# Altium footprint library Footprint_Vlad.PcbLib: 392 footprints (part 8 of 25)
Each footprint in its own frame and in the unit in brackets; x right, y up, seen from the top. Pads: shape width x height; smd on the part's side, far side on the other; paste and mask are expansions set on the pad; w line width, h text height; cw(c..) or ccw(c..) is an arc to the next point about the centre after c.
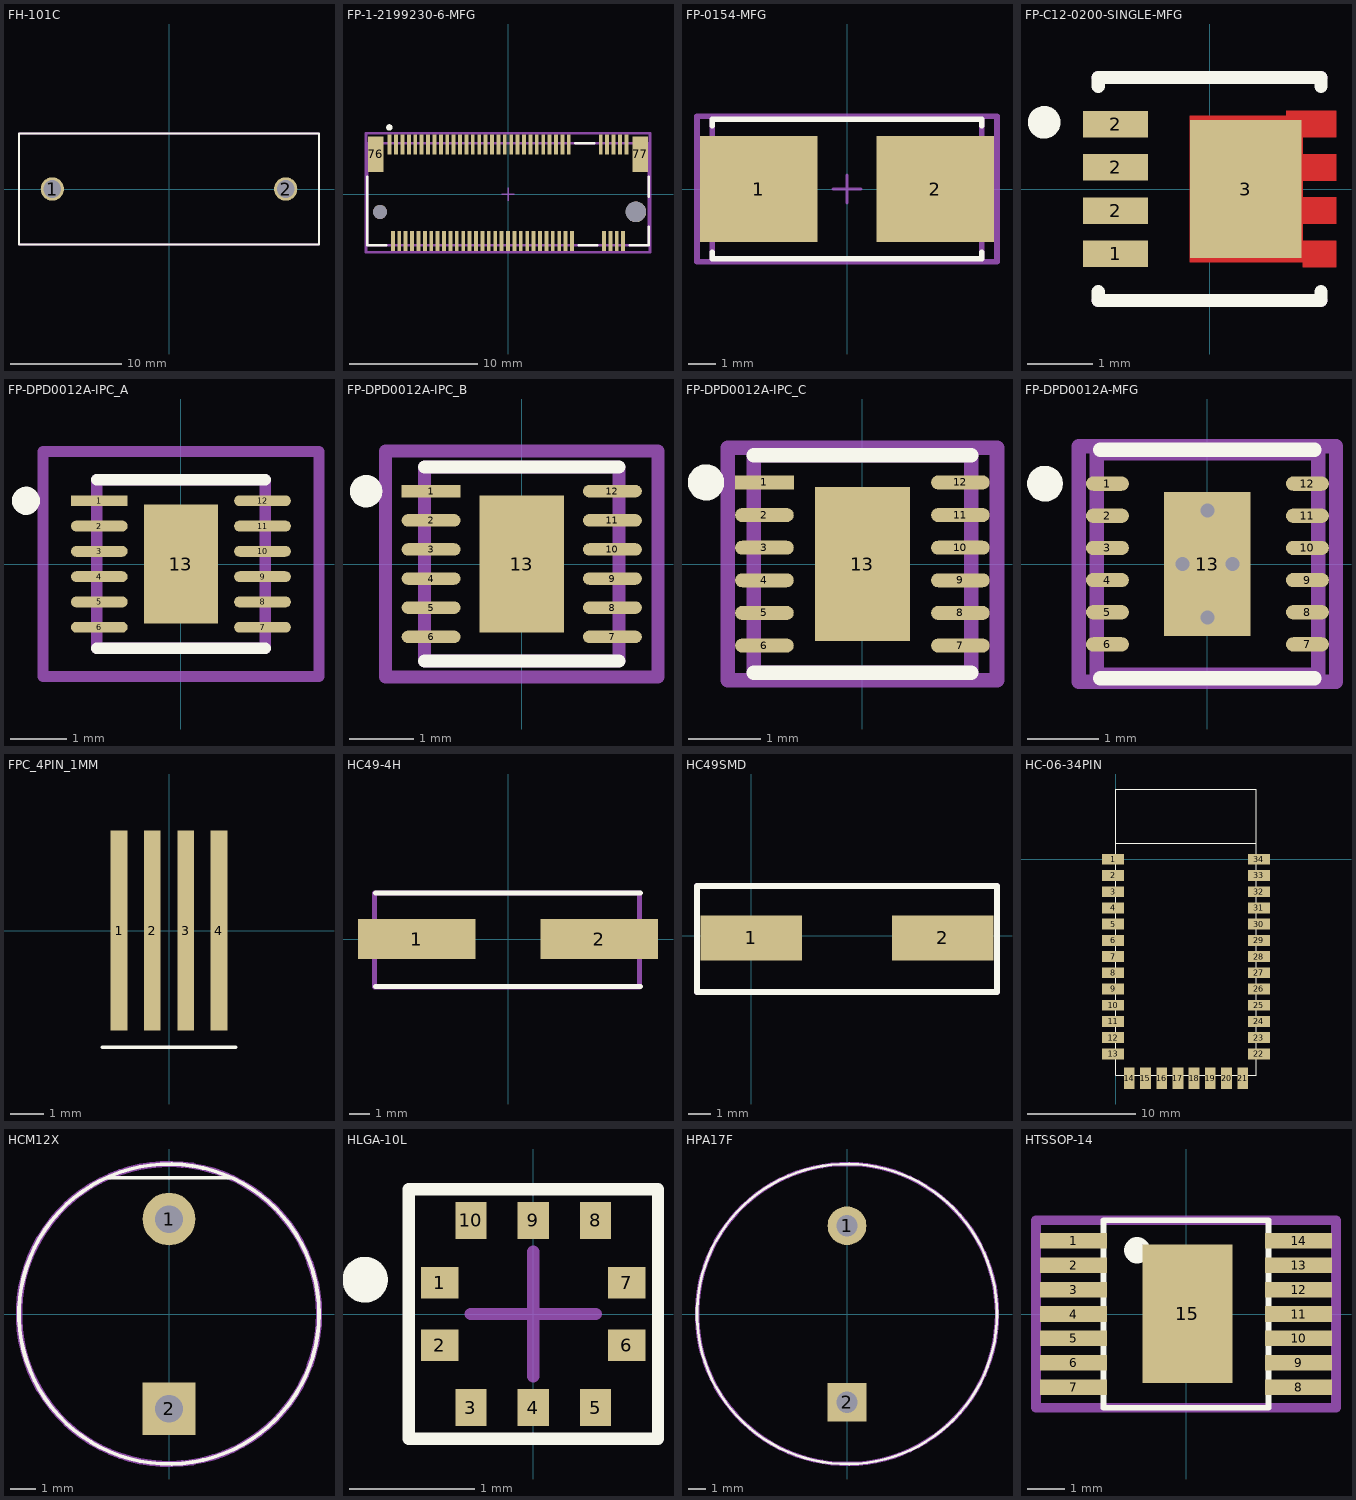
[diagram p7: the footprints below, top view; thin cyan lines are the x and y axes]

## FH-101C [mm]
pads (2):
  round 2.1 hole 1.6 unplated: 1(-10.5,0) 2(10.5,0)
Top Overlay:
  lines w0.2: -13.5,-5 13.5,-5 13.5,5 -13.5,5 -13.5,-5
Mechanical 13:
  lines w0.2: -13.5,-5 -13.5,5 13.5,5 13.5,-5 -13.5,-5
3D body: height 13.4, standoff 0, extent -13.6,-5.1 13.6,5.1

## FP-1-2199230-6-MFG [mm]
pads (71):
  rect 0.3x1.55 smd paste+0 mask+0: 1(-9.25,3.9) 2(-9,-3.65) 3(-8.75,3.9) 4(-8.5,-3.65) 5(-8.25,3.9) 6(-8,-3.65) 7(-7.75,3.9) 8(-7.5,-3.65) 9(-7.25,3.9) 10(-7,-3.65) 11(-6.75,3.9) 12(-6.5,-3.65) 13(-6.25,3.9) 14(-6,-3.65) 15(-5.75,3.9) 16(-5.5,-3.65) 17(-5.25,3.9) 18(-5,-3.65) 19(-4.75,3.9) 20(-4.5,-3.65) 21(-4.25,3.9) 22(-4,-3.65) 23(-3.75,3.9) 24(-3.5,-3.65) 25(-3.25,3.9) 26(-3,-3.65) 27(-2.75,3.9) 28(-2.5,-3.65) 29(-2.25,3.9) 30(-2,-3.65) 31(-1.75,3.9) 32(-1.5,-3.65) 33(-1.25,3.9) 34(-1,-3.65) 35(-0.75,3.9) 36(-0.5,-3.65) 37(-0.25,3.9) 38(0,-3.65) 39(0.25,3.9) 40(0.5,-3.65) 41(0.75,3.9) 42(1,-3.65) 43(1.25,3.9) 44(1.5,-3.65) 45(1.75,3.9) 46(2,-3.65) 47(2.25,3.9) 48(2.5,-3.65) 49(2.75,3.9) 50(3,-3.65) 51(3.25,3.9) 52(3.5,-3.65) 53(3.75,3.9) 54(4,-3.65) 55(4.25,3.9) 56(4.5,-3.65) 57(4.75,3.9) 58(5,-3.65) 67(7.25,3.9) 68(7.5,-3.65) 69(7.75,3.9) 70(8,-3.65) 71(8.25,3.9) 72(8.5,-3.65) 73(8.75,3.9) 74(9,-3.65) 75(9.25,3.9)
  rect 1.2x2.75 smd paste+0 mask+0: 76(-10.35,3.125) 77(10.35,3.125)
  round 1.1 hole 1.1 unplated paste-1000 mask+0: ""(-10,-1.375)
  round 1.6 hole 1.6 unplated paste-1000 mask+0: ""(10,-1.375)
Top Overlay:
  circle w0.25: c-9.275,5.225 r0.125
  lines w0.2: -11,1.375 -11,-3.975 -9.525,-3.975 ; 5.275,3.975 6.725,3.975 ; 5.525,-3.975 6.975,-3.975 ; 9.525,-3.975 11,-3.975 11,-2.55 ; 11,-0.2 11,1.375
Assembly Bottom:
  lines w0.2: -11.1,-4.525 -11.1,4.775 11.1,4.775 11.1,-4.525 -11.1,-4.525
  text ".Designator" at 0,0.124 h1
Mechanical 13:
  lines w0.2: -11,-3.975 -11,3.975 11,3.975 11,-3.975 -11,-3.975
Mechanical 15:
  lines w0.2: -11.1,-4.525 -11.1,4.775 11.1,4.775 11.1,-4.525 -11.1,-4.525
Mechanical 16:
  lines w0.1: -0.5,0 0.5,0 ; 0,-0.5 0,0.5
3D body "Conn_TE_1-2199230-6_eec.STEP": height 0.25, standoff 0, extent -11.1,-4.525 11.1,4.775

## FP-0154-MFG [mil]
pads (2):
  rect 167x150 smd paste+0 mask+0: 1(-125.5,0) 2(125.5,0)
Top Overlay:
  lines w7.87: -191.54,-89.76 -191.54,-99.02 191.54,-99.02 191.54,-89.76 ; -191.54,89.76 -191.54,99.02 191.54,99.02 191.54,89.76
Assembly Top:
  lines w7.87: -212.94,-102.95 212.94,-102.95 212.94,102.95 -212.94,102.95 -212.94,-102.95
  text ".Designator" at 0,7.39 h39.37
Courtyard Top:
  lines w7.87: -212.94,-102.95 212.94,-102.95 212.94,102.95 -212.94,102.95 -212.94,-102.95
3D Body Top:
  lines w7.87: -191.54,-99.02 191.54,-99.02 191.54,99.02 -191.54,99.02 -191.54,-99.02
Top Component Center:
  lines w3.94: -19.68,0 19.68,0 ; 0,-19.68 0,19.68
3D body "Fuse_Littelfuse_Inc_0154_125DR_eec.STEP": height 10, standoff 0, extent -212.94,-102.95 212.94,102.95

## FP-C12-0200-SINGLE-MFG [mil]
pads (5):
  rect 39x16 smd paste+0 mask+0: 1(-56.5,-39) 2(-56.5,-13) 2(-56.5,13) 2(-56.5,39)
  rect 66.93x82.68 smd paste+0 mask+0: 3(21.65,0)
Top Layer:
  region: 76,47 46,47 46,44 -12,44 -12,-44 56,-44 56,-47 76,-47 76,-31 56,-31 56,-21 76,-21 76,-5 56,-5 56,5 76,5 76,21 56,21 56,31 76,31
Top Overlay:
  circle w9.84: c-99.41,40.11 r4.92
  lines w7.87: -66.93,-61.76 -66.93,-66.93 66.93,-66.93 66.93,-61.76 ; -66.93,61.76 -66.93,66.93 66.93,66.93 66.93,61.76
3D Body Top:
  lines w7.87: -66.93,-66.93 66.93,-66.93 ; -66.93,66.93 66.93,66.93
3D body "Trans_Vishay_SISS71DN-T1-GE3_eec.STEP": height 10, standoff 0, extent -79.94,-70.87 79.94,70.87

## FP-DPD0012A-IPC_A [mm]
pads (13):
  rect 1.01x0.192 smd paste+0 mask+0: 1(-1.451,1.125)
  rrect100% 1.01x0.192 smd paste+0 mask+0: 2(-1.451,0.675) 3(-1.451,0.225) 4(-1.451,-0.225) 5(-1.451,-0.675) 6(-1.451,-1.125) 7(1.451,-1.125) 8(1.451,-0.675) 9(1.451,-0.225) 10(1.451,0.225) 11(1.451,0.675) 12(1.451,1.125)
  rect 1.31x2.12 smd paste-1000 mask+0: 13(0,0)
Top Overlay:
  circle w0.25: c-2.756,1.125 r0.125
  lines w0.2: -1.5,-1.5 1.5,-1.5 ; -1.5,1.5 1.5,1.5
Top Paste:
  rectangle: -0.362,-0.767 0.362,0.767
Assembly Bottom:
  lines w0.2: -2.456,-2 2.456,-2 2.456,2 -2.456,2 -2.456,-2
  text ".Designator" at -0.5,2.088 h1
Mechanical 13:
  lines w0.2: -1.5,-1.5 1.5,-1.5 1.5,1.5 -1.5,1.5 -1.5,-1.5
Mechanical 15:
  lines w0.2: -2.456,-2 2.456,-2 2.456,2 -2.456,2 -2.456,-2
Mechanical 16:
  lines w0.1: -0.5,0 0.5,0 ; 0,-0.5 0,0.5
3D body "IC_Texas_Instruments_TPS65133DPDR_eec.STEP": height 0.25, standoff 0, extent -2.456,-2 2.456,2

## FP-DPD0012A-IPC_B [mm]
pads (13):
  rect 0.91x0.192 smd paste+0 mask+0: 1(-1.401,1.125)
  rrect100% 0.91x0.192 smd paste+0 mask+0: 2(-1.401,0.675) 3(-1.401,0.225) 4(-1.401,-0.225) 5(-1.401,-0.675) 6(-1.401,-1.125) 7(1.401,-1.125) 8(1.401,-0.675) 9(1.401,-0.225) 10(1.401,0.225) 11(1.401,0.675) 12(1.401,1.125)
  rect 1.31x2.12 smd paste-1000 mask+0: 13(0,0)
Top Overlay:
  circle w0.25: c-2.406,1.125 r0.125
  lines w0.2: -1.5,-1.5 1.5,-1.5 ; -1.5,1.5 1.5,1.5
Top Paste:
  rectangle: -0.362,-0.767 0.362,0.767
Assembly Bottom:
  lines w0.2: -2.106,-1.75 2.106,-1.75 2.106,1.75 -2.106,1.75 -2.106,-1.75
  text ".Designator" at -0.3,1.888 h1
Mechanical 13:
  lines w0.2: -1.5,-1.5 1.5,-1.5 1.5,1.5 -1.5,1.5 -1.5,-1.5
Mechanical 15:
  lines w0.2: -2.106,-1.75 2.106,-1.75 2.106,1.75 -2.106,1.75 -2.106,-1.75
Mechanical 16:
  lines w0.1: -0.5,0 0.5,0 ; 0,-0.5 0,0.5
3D body "IC_Texas_Instruments_TPS65133DPDR_eec.STEP": height 0.25, standoff 0, extent -2.106,-1.75 2.106,1.75

## FP-DPD0012A-IPC_C [mm]
pads (13):
  rect 0.81x0.192 smd paste+0 mask+0: 1(-1.351,1.125)
  rrect100% 0.81x0.192 smd paste+0 mask+0: 2(-1.351,0.675) 3(-1.351,0.225) 4(-1.351,-0.225) 5(-1.351,-0.675) 6(-1.351,-1.125) 7(1.351,-1.125) 8(1.351,-0.675) 9(1.351,-0.225) 10(1.351,0.225) 11(1.351,0.675) 12(1.351,1.125)
  rect 1.31x2.12 smd paste-1000 mask+0: 13(0,0)
Top Overlay:
  circle w0.25: c-2.156,1.125 r0.125
  lines w0.2: -1.5,-1.5 1.5,-1.5 ; -1.5,1.5 1.5,1.5
Top Paste:
  rectangle: -0.362,-0.767 0.362,0.767
Assembly Bottom:
  lines w0.2: -1.856,-1.6 -1.856,1.6 1.856,1.6 1.856,-1.6 -1.856,-1.6
  text ".Designator" at -0.4,1.688 h1
Mechanical 13:
  lines w0.2: -1.5,-1.5 -1.5,1.5 1.5,1.5 1.5,-1.5 -1.5,-1.5
Mechanical 15:
  lines w0.2: -1.856,-1.6 -1.856,1.6 1.856,1.6 1.856,-1.6 -1.856,-1.6
Mechanical 16:
  lines w0.1: -0.5,0 0.5,0 ; 0,-0.5 0,0.5
3D body "IC_Texas_Instruments_TPS65133DPDR_eec.STEP": height 0.25, standoff 0, extent -1.856,-1.6 1.856,1.6

## FP-DPD0012A-MFG [mm]
pads (13):
  rrect100% 0.6x0.2 smd paste+0 mask+0: 1(-1.4,1.125) 2(-1.4,0.675) 3(-1.4,0.225) 4(-1.4,-0.225) 5(-1.4,-0.675) 6(-1.4,-1.125) 7(1.4,-1.125) 8(1.4,-0.675) 9(1.4,-0.225) 10(1.4,0.225) 11(1.4,0.675) 12(1.4,1.125)
  rect 1.21x2.02 smd paste-1000 mask+0: 13(0,0)
via 0,0.75 diameter 0.5 hole 0.2
via 0,-0.75 diameter 0.5 hole 0.2
via 0.35,0 diameter 0.5 hole 0.2
via -0.35,0 diameter 0.5 hole 0.2
Top Overlay:
  circle w0.25: c-2.275,1.125 r0.125
  lines w0.2: -1.5,-1.6 1.5,-1.6 ; -1.5,1.6 1.5,1.6
Top Paste:
  rectangle: -0.565,0.1 0.565,1
  rectangle: -0.565,-1 0.565,-0.1
Assembly Bottom:
  lines w0.2: -1.8,-1.65 1.8,-1.65 1.8,1.65 -1.8,1.65 -1.8,-1.65
  text ".Designator" at -0.4,1.788 h1
Mechanical 13:
  lines w0.2: -1.55,-1.55 1.55,-1.55 1.55,1.55 -1.55,1.55 -1.55,-1.55
Mechanical 15:
  lines w0.2: -1.8,-1.65 1.8,-1.65 1.8,1.65 -1.8,1.65 -1.8,-1.65
Mechanical 16:
  lines w0.1: -0.5,0 0.5,0 ; 0,-0.5 0,0.5
3D body "IC_Texas_Instruments_TPS65133DPDR_eec.STEP": height 0.25, standoff 0, extent -1.8,-1.65 1.8,1.65

## FPC_4PIN_1MM [mm]
pads (4):
  rect 0.5x6 smd: 1(-1.5,0) 2(-0.5,0) 3(0.5,0) 4(1.5,0)
Top Overlay:
  lines w0.1: -2,-3.5 2,-3.5

## HC49-4H [mm]
pads (2):
  rect 5.9x2 smd: 1(-4.572,0) 2(4.572,0)
Top Overlay:
  lines w0.254: -6.655,-2.39 6.645,-2.39 ; -6.655,2.31 6.645,2.31
Mechanical 15:
  lines w0.254: -6.7,-2.4 -6.7,2.3 6.6,2.3 6.6,-2.4 -6.7,-2.4
  text ".Designator" at -2.5,2.7 h1.52
3D body "SW3dPS-hc49_cystal.STEP": height 5.08, standoff 0, extent -6.7,-2.45 6.7,2.45

## HC49SMD [mm]
pads (2):
  rect 4.5x2 smd: 1(0,-0.1) 2(8.5,-0.1)
Top Overlay:
  lines w0.254: -2.4,-2.5 -2.4,2.2 10.9,2.2 10.9,-2.5 -2.4,-2.5
Mechanical 15:
  lines w0.254: -2.4,-2.5 -2.4,2.2 10.9,2.2 10.9,-2.5 -2.4,-2.5
  text ".Designator" at -1.5,2.5 h1.52

## HC-06-34PIN [mm]
pads (34):
  rect 2x1 smd: 1(-0.25,0) 2(-0.25,-1.5) 3(-0.25,-3) 4(-0.25,-4.5) 5(-0.25,-6) 6(-0.25,-7.5) 7(-0.25,-9) 8(-0.25,-10.5) 9(-0.25,-12) 10(-0.25,-13.5) 11(-0.25,-15) 12(-0.25,-16.5) 13(-0.25,-18) 22(13.25,-18) 23(13.25,-16.5) 24(13.25,-15) 25(13.25,-13.5) 26(13.25,-12) 27(13.25,-10.5) 28(13.25,-9) 29(13.25,-7.5) 30(13.25,-6) 31(13.25,-4.5) 32(13.25,-3) 33(13.25,-1.5) 34(13.25,0)
  rect 1x2 smd: 14(1.25,-20.25) 15(2.75,-20.25) 16(4.25,-20.25) 17(5.75,-20.25) 18(7.25,-20.25) 19(8.75,-20.25) 20(10.25,-20.25) 21(11.75,-20.25)
Top Overlay:
  lines w0.1: 0,1.5 13,1.5 ; 0,-20 0,6.5 13,6.5 13,-20 0,-20
Mechanical 15:
  text ".Designator" at 0,6.7 h1.52

## HCM12X [mm]
height 9.5
pads (2):
  round 2.1 hole 1.1: 1(0,3.8)
  rect 2.1x2.1 hole 1.1: 2(0,-3.8)
Top Overlay:
  circle w0.15: c0,0 r6
  lines w0.15: -2.475,5.45 2.463,5.45
Mechanical 15:
  circle w0.254: c0,0 r6
3D body: height 0.5, standoff -6.5, extent -0.299,3.501 0.299,4.099
3D body: height 0.5, standoff -5, extent -0.299,-4.099 0.299,-3.501
3D body: height 9.5, standoff 0.5, extent -6,-6 6,6

## HLGA-10L [mm]
pads (10):
  rect 0.3x0.25 smd: 1(-0.75,0.25) 2(-0.75,-0.25) 6(0.75,-0.25) 7(0.75,0.25)
  rect 0.25x0.3 smd: 3(-0.5,-0.75) 4(0,-0.75) 5(0.5,-0.75) 8(0.5,0.75) 9(0,0.75) 10(-0.5,0.75)
Top Overlay:
  circle w0.254: c-1.35,0.275 r0.056
  lines w0.1: -1,-1 -1,1 1,1 1,-1 -1,-1
Mechanical 15:
  lines w0.1: -0.5,0 0.5,0 ; 0,-0.5 0,0 0,0.5
3D body: height 0.8, standoff 0, extent -1,-1 1,1

## HPA17F [mm]
height 7.3
pads (2):
  round 2.2 hole 1.2: 1(0,5)
  rect 2.2x2.2 hole 1.2: 2(0,-5)
Top Overlay:
  circle w0.15: c0,0 r8.5
Mechanical 15:
  circle w0.254: c0,0 r8.5
3D body: height 0.5, standoff -6.5, extent -0.349,4.651 0.349,5.349
3D body: height 0.5, standoff -6.5, extent -0.349,-5.349 0.349,-4.651
3D body: height 7.3, standoff 0.5, extent -8.5,-8.497 8.5,8.497

## HTSSOP-14 [mm]
pads (15):
  rect 1.78x0.42 smd: 1(-3,1.95) 2(-3,1.3) 3(-3,0.65) 4(-3,0) 5(-3,-0.65) 6(-3,-1.3) 7(-3,-1.95) 8(3,-1.95) 9(3,-1.3) 10(3,-0.65) 11(3,0) 12(3,0.65) 13(3,1.3) 14(3,1.95)
  rect 2.4x3.7 smd: 15(0.04,0.01)
Top Overlay:
  circle w0.4: c-1.3,1.7 r0.15
  lines w0.15: -2.2,-2.5 -2.2,2.5 2.2,2.5 2.2,-2.5 -2.2,-2.5
Mechanical 15:
  lines w0.254: -4,-2.5 4,-2.5 4,2.5 -4,2.5 -4,-2.5
  text ".Designator" at -2.2,2.7 h1.52
3D body "User Library-SSOP14-P065.STEP": height 1.68, standoff -0.13, extent -3.025,-2.5 2.975,2.5